# Altium schematic symbol library LUCID_Connectors.SchLib: 1 symbol
Pins are listed as number, name and electrical type; pins without a type are passive.

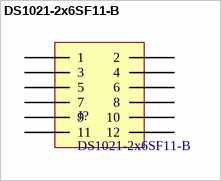
[diagram p0: symbol DS1021-2x6SF11-B]

## DS1021-2x6SF11-B
designator J?
For testing. Dims PWM; LCSC Part #: C7430402
footprint LUCID_Connectors
pins: 1, 2, 3, 4, 5, 6, 7, 8, 9, 10, 11, 12